# Altium footprint library 5-1814832-1.PcbLib: 1 footprints
Each footprint in its own frame and in the unit in brackets; x right, y up, seen from the top. Pads: shape width x height; smd on the part's side, far side on the other; paste and mask are expansions set on the pad; w line width, h text height; cw(c..) or ccw(c..) is an arc to the next point about the centre after c.
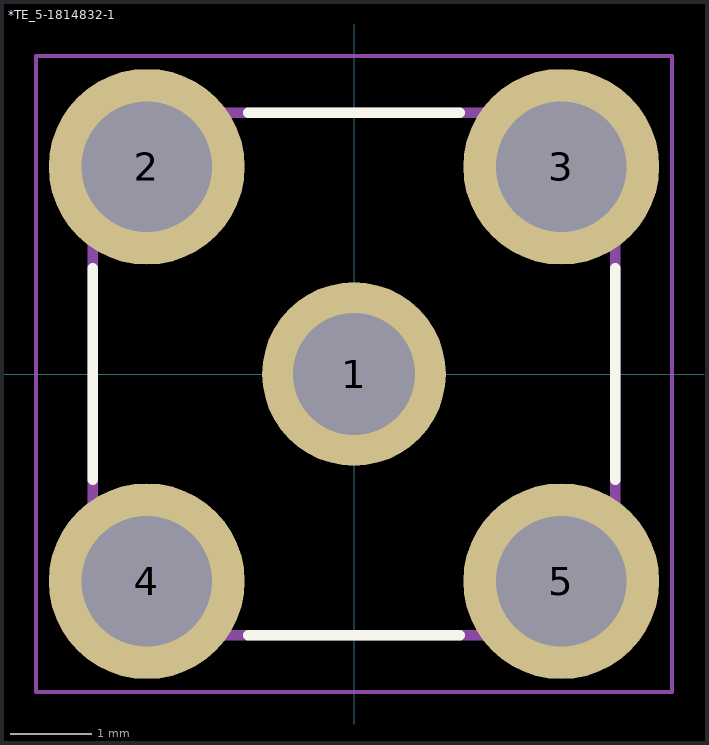
[diagram p0: the footprint, top view; thin cyan lines are the x and y axes]

## *TE_5-1814832-1 [mm]
pads (5):
  round 2.25 hole 1.5: 1(0,0)
  round 2.4 hole 1.6: 2(-2.54,2.54) 3(2.54,2.54) 4(-2.54,-2.54) 5(2.54,-2.54)
Top Overlay:
  lines w0.127: -3.2,-1.3 -3.2,1.3 ; -1.3,-3.2 1.3,-3.2 ; -1.3,3.2 1.3,3.2 ; 3.2,-1.3 3.2,1.3
Mechanical 13:
  lines w0.127: -3.2,-3.2 -3.2,3.2 ; -3.2,-3.2 3.2,-3.2 ; -3.2,-3.2 -3.2,3.2 ; -3.2,-3.2 3.2,-3.2 ; -3.2,3.2 3.2,3.2 ; -3.2,3.2 3.2,3.2 ; 3.2,-3.2 3.2,3.2 ; 3.2,-3.2 3.2,3.2
Mechanical 15:
  lines w0.05: -3.9,-3.9 -3.9,3.9 3.9,3.9 3.9,-3.9 -3.9,-3.9